# Altium schematic symbol library EEPROM.SCHLIB: 1 symbol
Pins are listed as number, name and electrical type; pins without a type are passive.

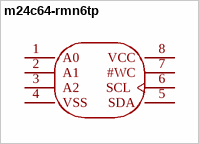
[diagram p0: symbol m24c64-rmn6tp]

## m24c64-rmn6tp
designator U??  (value not drawn)
接口类型:I2C;存储容量:64Kbit;时钟频率(fc):1MHz;; Manufacturer: ST(意法半导体); AddInBom: yes; ModelId: 7abc64c95a1a4a04a4ef38f9097c870b; ModelName: SOIC-8_L5.0-W4.0-P1.27-LS6.0-BL; ModelTransform: 192.913,236.22,0,0,0,0,0,0,0; Interface: I2C; Memory Size: 64Kbit; Clock Frequency: 1MHz; Write Cycle Time(Tw): 5ms; Data Retention - TDR (Year): 200年; Write Cycle Endurance: 400万次; Voltage - Supply: 1.8V~5.5V; Symbol: M24C64-RMN6TP; LCSC Part Name: 64 Kbit串行I2C总线EEPROM; SupplierPart: C79988; ManufacturerPart: M24C64-RMN6TP; Supplier Footprint: SOIC-8; JLCPCB Part Class: Extended Part; Datasheet: https://item.szlcsc.com/datasheet/M24C64-RMN6TP/81133.html; Supplier: LCSC; ConvertToPcb: yes; FootprintName: SOIC-8_L5.0-W4.0-P1.27-LS6.0-BL; Features: 内置上电复位(POR)；硬件写保护功能；内置错误纠正码(ECC)功能; Operating Temperature: -40℃~+85℃
footprint SOIC-8_L5.0-W4.0-P1.27-LS6.0-BL
pins: 1 A0, 2 A1, 3 A2, 4 VSS, 5 SDA, 6 SCL, 7 #WC, 8 VCC